# Altium footprint library MeadowMinimum_Footprints.PcbLib: 16 footprints
Each footprint in its own frame and in the unit in brackets; x right, y up, seen from the top. Pads: shape width x height; smd on the part's side, far side on the other; paste and mask are expansions set on the pad; w line width, h text height; cw(c..) or ccw(c..) is an arc to the next point about the centre after c.
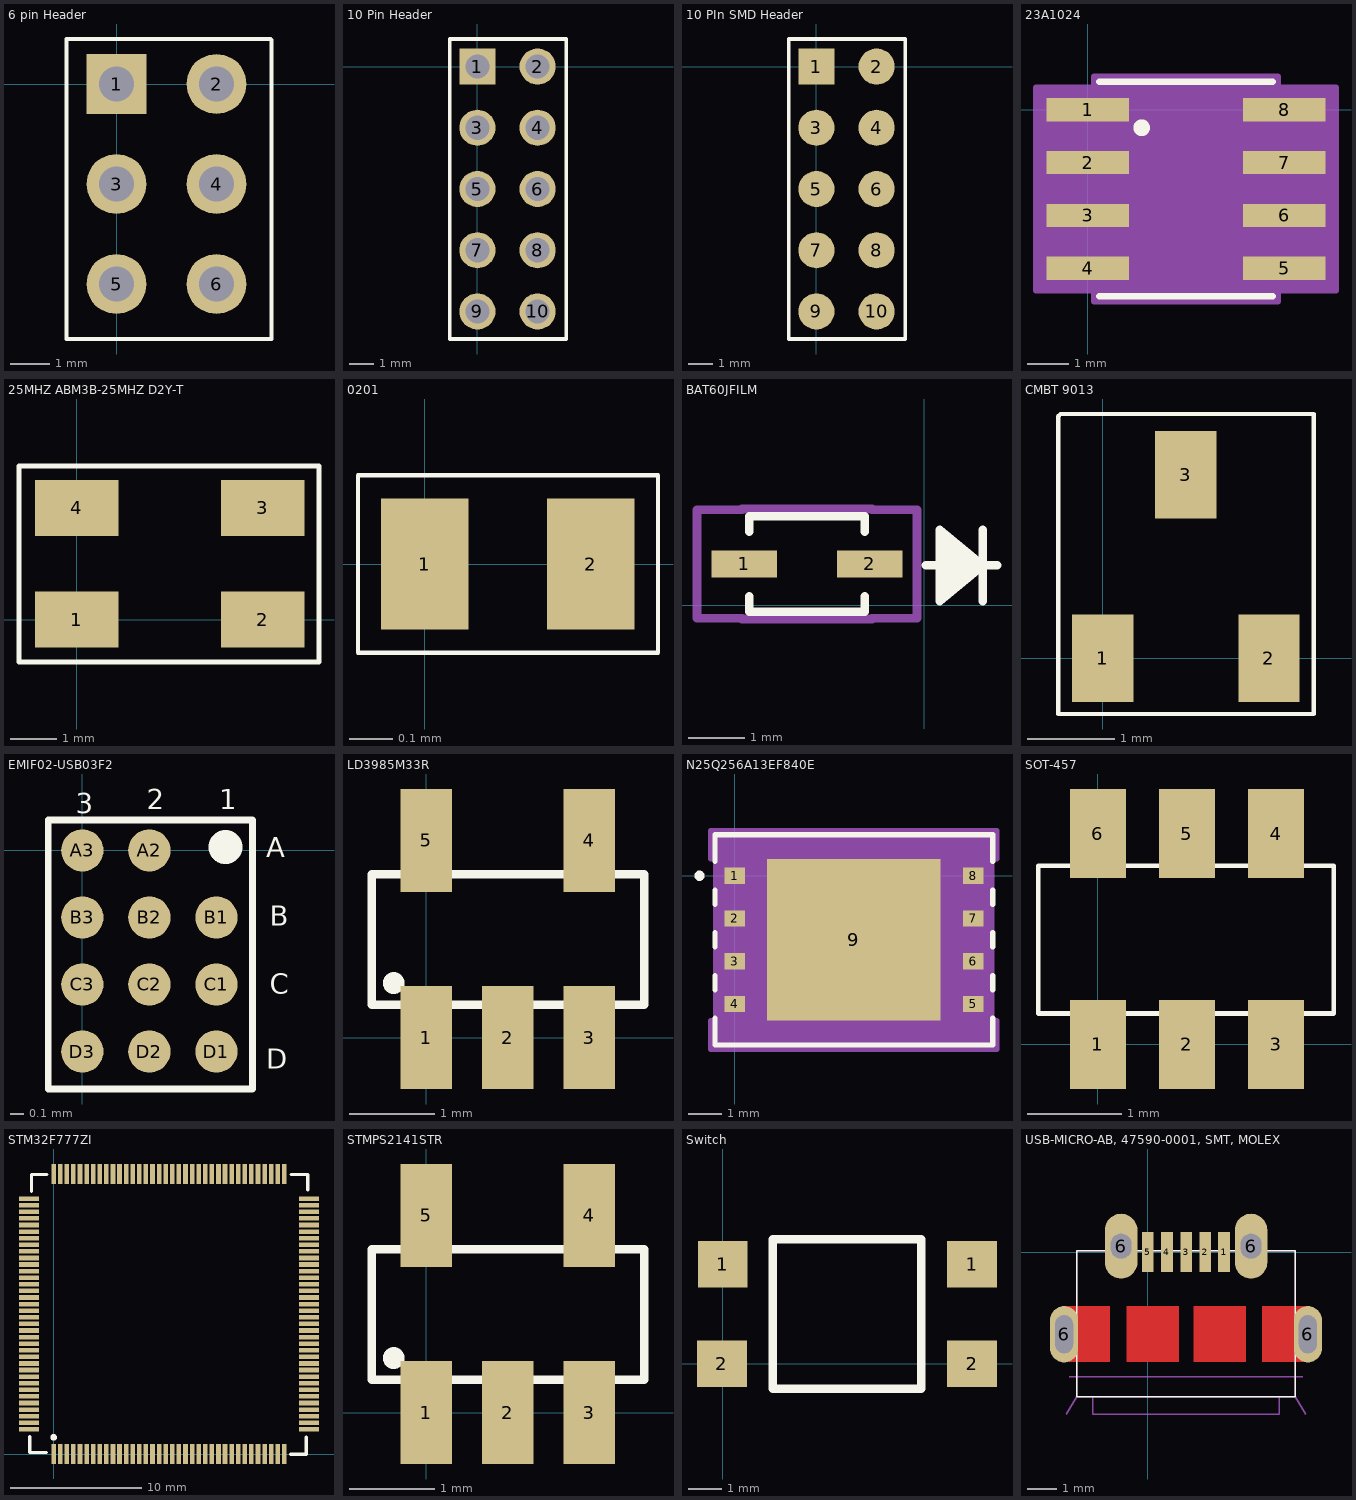
[diagram p0: the footprints below, top view; thin cyan lines are the x and y axes]

## 6 pin Header [mil] "Header3x2"
pads (6):
  rect 60x60 hole 35.43: 1(0,0)
  round 60 hole 35.43: 2(100,0) 3(0,-100) 4(100,-100) 5(0,-200) 6(100,-200)
Top Overlay:
  lines w3.94: 154,45 -50,45 -50,-255 155,-255 155,44
3D body: height 295.28, standoff -149.61, extent -48.85,-251 148,49

## 10 Pin Header [mm] "Header5x2"
pads (10):
  rect 1.5x1.5 hole 1: 1(0,0)
  round 1.5 hole 1: 2(2.5,0) 3(0,-2.54) 4(2.5,-2.54) 5(0,-5.08) 6(2.5,-5.08) 7(0,-7.62) 8(2.5,-7.62) 9(0,-10.16) 10(2.5,-10.16)
Top Overlay:
  lines w0.15: -1.143,-11.303 -0.762,-11.303 2.819,-11.303 3.683,-11.303 3.683,1.143 -1.143,1.143 -1.143,-11.303
3D body: height 8, standoff -3.3, extent -1.317,-11.303 3.683,1.397

## 10 PIn SMD Header [mm]
pads (10):
  rect 1.5x1.5 smd: 1(0,0)
  round 1.5 smd: 2(2.5,0) 3(0,-2.54) 4(2.5,-2.54) 5(0,-5.08) 6(2.5,-5.08) 7(0,-7.62) 8(2.5,-7.62) 9(0,-10.16) 10(2.5,-10.16)
Top Overlay:
  lines w0.15: -1.143,-11.303 -0.762,-11.303 2.819,-11.303 3.683,-11.303 3.683,1.143 -1.143,1.143 -1.143,-11.303

## 23A1024 [mil]
pads (8):
  rect 78x22 smd: 1(0,0) 2(0,-50) 3(0,-100) 4(0,-150) 5(186,-150) 6(186,-100) 7(186,-50) 8(186,0)
Top Overlay:
  circle w10: c51,-17 r2.83
  lines w6: 11,-176.5 175,-176.5 ; 11,26.5 175,26.5
Mechanical 13:
  lines w0: 81,21.5 ccw(c93,21.5) 105,21.5
Mechanical 15:
  region: 6,-171 -49,-171 -49,21 6,21 6,31.5 180,31.5 180,21 235,21 235,-171 180,-171 180,-181.5 6,-181.5
  lines w6: -49,-171 -49,21 6,21 6,31.5 180,31.5 180,21 235,21 235,-171 180,-171 180,-181.5 6,-181.5 6,-171 -49,-171
3D body: height 69.1, standoff 0, extent -25,-171.5 211,21.5
3D body: height 10, standoff 0, extent 93,-75 103,-65

## 25MHZ ABM3B-25MHZ D2Y-T [mm] "535-13452-1-ND"
pads (4):
  rect 1.8x1.2 smd: 1(0,0) 2(4,0) 3(4,2.4) 4(0,2.4)
Top Overlay:
  lines w0.1: -1.245,-0.914 5.207,-0.914 5.207,3.302 -1.245,3.302 -1.245,-0.914
3D body: height 1.1, standoff -0.01, extent -0.493,-0.368 4.507,2.807

## 0201 [mm] "yageo"
pads (2):
  rect 0.2x0.3 smd paste+0 mask+0.03: 1(0,0) 2(0.38,0)
Top Overlay:
  lines w0.01: -0.152,-0.203 0.533,-0.203 0.533,0.203 -0.152,0.203 -0.152,-0.203
3D body: height 0.23, standoff 0.01, extent -0.152,-0.203 0.533,0.203

## BAT60JFILM [mil] "497-3707-1-ND"
pads (2):
  rect 46x19 smd: 1(-126,29) 2(-38,29)
Top Overlay:
  lines w6: -122.5,6.4 -122.5,-4.5 -41.5,-4.5 -41.5,6.4 ; -122.5,51.6 -122.5,62.5 -41.5,62.5 -41.5,51.6 ; 1,28 51,28 ; 11,8 41,28 ; 11,13 41,28 ; 11,18 41,28 ; 11,23 41,28 ; 11,33 41,28 ; 11,38 41,28 ; 11,43 41,28 ; 11,48 41,28 ; 41,3 41,53 ; 41,28 11,53 11,3 41,28
Mechanical 15:
  lines w6: -159,-9 -159,67 -127.5,67 -127.5,67.5 -36.5,67.5 -36.5,67 -5,67 -5,-9 -36.5,-9 -36.5,-9.5 -127.5,-9.5 -127.5,-9 -159,-9
3D body: height 10, standoff 0, extent -82,29 -72,39
3D body: height 46.1, standoff 0, extent -135,-0.5 -29,56.5

## CMBT 9013 [mm]
pads (3):
  rect 0.7x1 smd: 1(0,0) 2(1.9,0) 3(0.95,2.1)
Top Overlay:
  lines w0.05: -0.508,-0.635 2.413,-0.635 2.413,2.794 -0.483,2.794 -0.508,2.769 -0.508,-0.635
3D body: height 0.95, standoff 0.2, extent 0,0 1.9,2.032

## EMIF02-USB03F2 [mm] "497-13521-2-ND"
pads (11):
  round 0.315 smd mask+0.05: A2(0.5,0) A3(0,0) B1(1,-0.5) B2(0.5,-0.5) B3(0,-0.5) C1(1,-1) C2(0.5,-1) C3(0,-1) D1(1,-1.5) D2(0.5,-1.5) D3(0,-1.5)
Top Overlay:
  circle w0.254: c1.067,0.024 r0
  lines w0.05: -0.254,-1.779 1.27,-1.779 1.27,0.227 -0.254,0.227 -0.254,-1.779
  text "A" at 1.372,-0.052 h0.15
  text "B" at 1.397,-0.56 h0.15
  text "C" at 1.397,-1.068 h0.15
  text "D" at 1.372,-1.627 h0.15
  text "3" at -0.051,0.278 h0.15
  text "2" at 0.479,0.308 h0.15
  text "1" at 1.021,0.307 h0.15
3D body: height 0.65, standoff 0.1, extent -0.254,-1.779 1.27,0.227

## LD3985M33R [mm] "497-3504-1-ND"
pads (5):
  rect 0.6x1.2 smd: 1(0,0) 2(0.95,0) 3(1.9,0) 4(1.9,2.3) 5(0,2.3)
Top Overlay:
  circle w0.254: c-0.381,0.635 r0
  lines w0.1: -0.635,0.381 2.54,0.381 2.54,1.905 -0.635,1.905 -0.635,0.381
3D body: height 1.45, standoff 0.2, extent -0.635,0.381 2.54,1.905

## N25Q256A13EF840E [mil]
pads (9):
  rect 24x19 smd: 1(0,0) 2(0,-50) 3(0,-100) 4(0,-150) 5(279,-150) 6(279,-100) 7(279,-50) 8(279,0)
  rect 203x189 smd paste-101: 9(139.5,-75)
Top Overlay:
  circle w6: c-41,0 r3
  lines w6: -23,-166.61 -23,-198 302,-198 302,-166.61 ; -23,-133.39 -23,-116.61 ; -23,-83.39 -23,-66.61 ; -23,-33.39 -23,-16.61 ; -23,16.61 -23,48 302,48 302,16.61 ; 302,-133.39 302,-116.61 ; 302,-83.39 302,-66.61 ; 302,-33.39 302,-16.61
Top Paste:
  region: 84.81,15.56 41.94,15.56 41.94,-39.56 84.81,-39.56
  region: 84.81,-47.44 41.94,-47.44 41.94,-102.56 84.81,-102.56
  region: 84.81,-110.44 41.94,-110.44 41.94,-165.56 84.81,-165.56
  region: 135.56,15.56 92.69,15.56 92.69,-39.56 135.56,-39.56
  region: 135.56,-47.44 92.69,-47.44 92.69,-102.56 135.56,-102.56
  region: 135.56,-110.44 92.69,-110.44 92.69,-165.56 135.56,-165.56
  region: 186.31,15.56 143.44,15.56 143.44,-39.56 186.31,-39.56
  region: 186.31,-47.44 143.44,-47.44 143.44,-102.56 186.31,-102.56
  region: 186.31,-110.44 143.44,-110.44 143.44,-165.56 186.31,-165.56
  region: 237.06,15.56 194.19,15.56 194.19,-39.56 237.06,-39.56
  region: 237.06,-47.44 194.19,-47.44 194.19,-102.56 237.06,-102.56
  region: 237.06,-110.44 194.19,-110.44 194.19,-165.56 237.06,-165.56
Mechanical 13:
  circle w6: c12,0 r3
  lines w0: 127.5,43 ccw(c139.5,43) 151.5,43
Mechanical 15:
  region: -28,-169.5 -22,-169.5 -22,19.5 -28,19.5 -28,53 307,53 307,19.5 301,19.5 301,-169.5 307,-169.5 307,-203 -28,-203
  lines w6: -28,-203 -28,-169.5 -22,-169.5 -22,19.5 -28,19.5 -28,53 307,53 307,19.5 301,19.5 301,-169.5 307,-169.5 307,-203 -28,-203
3D body: height 39.1, standoff 0, extent -18.99,-192.99 300.01,43.01
3D body: height 10, standoff 0, extent 139.5,-75 149.5,-65

## SOT-457 [mm]
pads (6):
  rect 0.6x0.95 smd: 1(0,0) 2(0.95,0) 3(1.9,0) 4(1.9,2.25) 5(0.95,2.25) 6(0,2.25)
Top Overlay:
  lines w0.05: -0.635,0.33 -0.635,1.905 2.515,1.905 2.515,0.33 -0.635,0.33
  text "." at -0.432,0.762 h1

## STM32F777ZI [mm]
pads (144):
  rect 0.35x1.5 smd: 1(0,0) 2(0.5,0) 3(1,0) 4(1.5,0) 5(2,0) 6(2.5,0) 7(3,0) 8(3.5,0) 9(4,0) 10(4.5,0) 11(5,0) 12(5.5,0) 13(6,0) 14(6.5,0) 15(7,0) 16(7.5,0) 17(8,0) 18(8.5,0) 19(9,0) 20(9.5,0) 21(10,0) 22(10.5,0) 23(11,0) 24(11.5,0) 25(12,0) 26(12.5,0) 27(13,0) 28(13.5,0) 29(14,0) 30(14.5,0) 31(15,0) 32(15.5,0) 33(16,0) 34(16.5,0) 35(17,0) 36(17.5,0) 73(17.5,21.25) 74(17,21.25) 75(16.5,21.25) 76(16,21.25) 77(15.5,21.25) 78(15,21.25) 79(14.5,21.25) 80(14,21.25) 81(13.5,21.25) 82(13,21.25) 83(12.5,21.25) 84(12,21.25) 85(11.5,21.25) 86(11,21.25) 87(10.5,21.25) 88(10,21.25) 89(9.5,21.25) 90(9,21.25) 91(8.5,21.25) 92(8,21.25) 93(7.5,21.25) 94(7,21.25) 95(6.5,21.25) 96(6,21.25) 97(5.5,21.25) 98(5,21.25) 99(4.5,21.25) 100(4,21.25) 101(3.5,21.25) 102(3,21.25) 103(2.5,21.25) 104(2,21.25) 105(1.5,21.25) 106(1,21.25) 107(0.5,21.25) 108(0,21.25)
  rect 1.5x0.35 smd: 37(19.375,1.875) 38(19.375,2.375) 39(19.375,2.875) 40(19.375,3.375) 41(19.375,3.875) 42(19.375,4.375) 43(19.375,4.875) 44(19.375,5.375) 45(19.375,5.875) 46(19.375,6.375) 47(19.375,6.875) 48(19.375,7.375) 49(19.375,7.875) 50(19.375,8.375) 51(19.375,8.875) 52(19.375,9.375) 53(19.375,9.875) 54(19.375,10.375) 55(19.375,10.875) 56(19.375,11.375) 57(19.375,11.875) 58(19.375,12.375) 59(19.375,12.875) 60(19.375,13.375) 61(19.375,13.875) 62(19.375,14.375) 63(19.375,14.875) 64(19.375,15.375) 65(19.375,15.875) 66(19.375,16.375) 67(19.375,16.875) 68(19.375,17.375) 69(19.375,17.875) 70(19.375,18.375) 71(19.375,18.875) 72(19.375,19.375) 109(-1.875,19.375) 110(-1.875,18.875) 111(-1.875,18.375) 112(-1.875,17.875) 113(-1.875,17.375) 114(-1.875,16.875) 115(-1.875,16.375) 116(-1.875,15.875) 117(-1.875,15.375) 118(-1.875,14.875) 119(-1.875,14.375) 120(-1.875,13.875) 121(-1.875,13.375) 122(-1.875,12.875) 123(-1.875,12.375) 124(-1.875,11.875) 125(-1.875,11.375) 126(-1.875,10.875) 127(-1.875,10.375) 128(-1.875,9.875) 129(-1.875,9.375) 130(-1.875,8.875) 131(-1.875,8.375) 132(-1.875,7.875) 133(-1.875,7.375) 134(-1.875,6.875) 135(-1.875,6.375) 136(-1.875,5.875) 137(-1.875,5.375) 138(-1.875,4.875) 139(-1.875,4.375) 140(-1.875,3.875) 141(-1.875,3.375) 142(-1.875,2.875) 143(-1.875,2.375) 144(-1.875,1.875)
Top Overlay:
  circle w0.254: c0,1.27 r0.127
  lines w0.254: -1.804,1.304 -1.804,0.127 -0.534,0.127 ; -1.677,19.939 -1.677,21.209 -0.5,21.209 ; 17.974,0 19.151,0 19.151,1.27 ; 18.008,21.209 19.278,21.209 19.278,20.032
3D body: height 1.6, standoff 0.2, extent -1.905,0 19.304,21.336

## STMPS2141STR [mm] "497-6933-2-ND"
pads (5):
  rect 0.6x1.2 smd: 1(0,0) 2(0.95,0) 3(1.9,0) 4(1.9,2.3) 5(0,2.3)
Top Overlay:
  circle w0.254: c-0.381,0.635 r0
  lines w0.1: -0.635,0.381 2.54,0.381 2.54,1.905 -0.635,1.905 -0.635,0.381
3D body: height 1.45, standoff 0.2, extent -0.635,0.381 2.54,1.905

## Switch [mm] "SPST"
pads (4):
  rect 1.5x1.4 smd: 1(0,3) 1(7.5,3) 2(-0.025,0) 2(7.5,0)
Top Overlay:
  lines w0.254: 1.5,-0.75 1.5,3.75 5.975,3.75 5.975,-0.75 1.5,-0.75
3D body: height 2.9, standoff 0, extent 1.5,-0.75 5.975,3.75
3D body: height 3.4, standoff 2.9, extent 2.487,0.25 4.987,2.75
3D body: height 3.1, standoff 2.9, extent 1.631,2.927 2.331,3.627
3D body: height 3.1, standoff 2.9, extent 5.137,2.876 5.837,3.576
3D body: height 3.1, standoff 2.9, extent 1.631,-0.655 2.331,0.045
3D body: height 3.1, standoff 2.9, extent 5.137,-0.629 5.837,0.071

## USB-MICRO-AB, 47590-0001, SMT, MOLEX [mil] "WM17144TR-ND"
pads (9):
  rect 16x54 smd: 1(103.18,0) 2(77.59,0) 3(52,0) 4(26,0) 5(0,0)
  oval 38x76 hole 24 slot 51.18 at 90 deg: 6(-113,-111) 6(216.37,-111)
  oval 44x88 hole 28 slot 33.46 at 90 deg: 6(-36,8) 6(139.6,8)
Top Layer:
  region: 42,-148.4 42,-73 -29,-73 -29,-148.4
  region: -51,-148.4 -51,-73 -113,-73 -113,-148.4
  region: 61.84,-73 61.84,-148.4 132.71,-148.4 132.71,-73
  region: 154.36,-73 154.36,-148.4 216.37,-148.4 216.37,-73
Top Overlay:
  lines w2: -96,-195.65 -96,2 199.64,2 199.64,-195.65 -96,-195.65
Top Solder:
  region: 61.84,-73 61.84,-148.4 132.71,-148.4 132.71,-73
  region: 154.36,-73 154.36,-148.4 216.37,-148.4 216.37,-73
  region: 42,-148.4 42,-73 -29,-73 -29,-148.4
  region: -51,-148.4 -51,-73 -113,-73 -113,-148.4
Mechanical 11:
  lines w0: -125,-136.59 -101,-136.59 -101,-85 -125,-85 -125,-136.59 ; -50,-9 -50,24 -22,24 -22,-9 -50,-9 ; 125.82,-9 153.38,-9 153.38,24 125.82,24 125.82,-9 ; 204.56,-136.59 204.56,-85 228.18,-85 228.18,-136.59 204.56,-136.59
Mechanical 16:
  lines w2: -110,-219.27 -96,-195.65 ; -106,-168.09 209.48,-168.09 ; 213.42,-219.27 199.64,-195.65 ; -96,-195.65 -74,-195.65 ; -96,-195.65 -96,2 -47,2 ; -74,-195.65 177.98,-195.65 ; -74,-195.65 -74,-219.27 177.98,-219.27 177.98,-195.65 ; -47,2 -25,2 ; -47,2 -47,10 -25,10 -25,2 ; -25,2 128.77,2 ; 128.77,2 150.43,2 ; 128.77,2 128.77,10 150.43,10 150.43,2 ; 150.43,2 199.64,2 199.64,-195.65 ; 177.98,-195.65 199.64,-195.65
3D body: height 114.56, standoff -17.56, extent -118.27,-219 222.28,13.29